# Altium footprint library TLP383GR-TPL,E.PcbLib: 3 footprints
Each footprint in its own frame and in the unit in brackets; x right, y up, seen from the top. Pads: shape width x height; smd on the part's side, far side on the other; paste and mask are expansions set on the pad; w line width, h text height; cw(c..) or ccw(c..) is an arc to the next point about the centre after c.
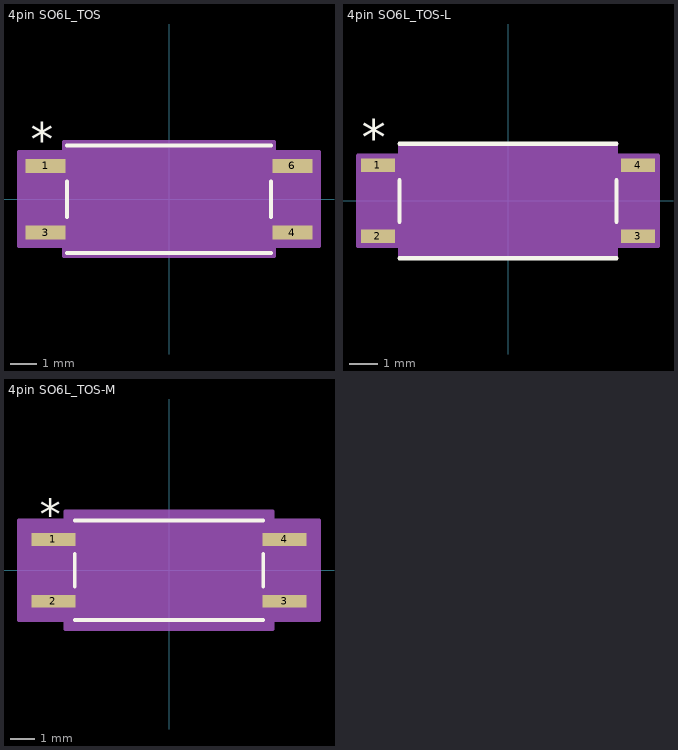
[diagram p0: the footprints below, top view; thin cyan lines are the x and y axes]

## 4pin SO6L_TOS [mil]
pads (4):
  rect 59.56x20.97 smd paste+0 mask+0: 1(-185,50) 3(-185,-50) 4(185,-50) 6(185,50)
Top Overlay:
  lines w6: -152.5,-80.5 152.5,-80.5 ; -152.5,-26.7 -152.5,26.7 ; -152.5,80.5 152.5,80.5 ; 152.5,-26.7 152.5,26.7
  text "*" at -207.5,65.97 h50
  text ".Designator" at -137.5,-25 h50
Mechanical 13:
  lines w1: -12,75.5 ccw(c0,75.5) 12,75.5 ; -201,-59.5 -147.5,-59.5 -147.5,-40.5 -201,-40.5 -201,-59.5 ; -201,40.5 -147.5,40.5 -147.5,59.5 -201,59.5 -201,40.5 ; -147.5,-75.5 -147.5,75.5 147.5,75.5 147.5,-75.5 -147.5,-75.5 ; 147.5,-59.5 201,-59.5 201,-40.5 147.5,-40.5 147.5,-59.5 ; 147.5,40.5 201,40.5 201,59.5 147.5,59.5 147.5,40.5
  text ".Designator" at -137.5,-25 h50
  text "*" at -145,22.5 h50
Mechanical 15:
  region: -157.5,-70.48 -224.78,-70.48 -224.78,70.48 -157.5,70.48 -157.5,85.5 157.5,85.5 157.5,70.48 224.78,70.48 224.78,-70.48 157.5,-70.48 157.5,-85.5 -157.5,-85.5
  lines w6: -224.78,-70.48 -157.5,-70.48 -157.5,-85.5 157.5,-85.5 157.5,-70.48 224.78,-70.48 224.78,70.48 157.5,70.48 157.5,85.5 -157.5,85.5 -157.5,70.48 -224.78,70.48 -224.78,-70.48
3D body "4pinSO6L_TOS.step": height 87.09, standoff 0, extent -200.98,-75.51 200.98,75.51

## 4pin SO6L_TOS-L [mil]
pads (4):
  rect 47.75x19 smd paste+0 mask+0: 1(-183.03,50) 2(-183.03,-50) 3(183.03,-50) 4(183.03,50)
Top Overlay:
  lines w6: -152.5,-80.5 152.5,-80.5 ; -152.5,-29.22 -152.5,29.22 ; -152.5,80.5 152.5,80.5 ; 152.5,-29.22 152.5,29.22
  text ".Designator" at -137.5,-25 h50
  text "*" at -205.53,64 h50
Mechanical 13:
  lines w1: -12,75.5 ccw(c0,75.5) 12,75.5 ; -201,-59.5 -201,-40.5 -147.5,-40.5 -147.5,-59.5 -201,-59.5 ; -201,40.5 -201,59.5 -147.5,59.5 -147.5,40.5 -201,40.5 ; -147.5,-75.5 147.5,-75.5 147.5,75.5 -147.5,75.5 -147.5,-75.5 ; 147.5,-59.5 147.5,-40.5 201,-40.5 201,-59.5 147.5,-59.5 ; 147.5,40.5 147.5,59.5 201,59.5 201,40.5 147.5,40.5
  text "*" at -145,22.5 h50
  text ".Designator" at -137.5,-25 h50
Mechanical 15:
  region: -151.5,-63.5 -210.91,-63.5 -210.91,63.5 -151.5,63.5 -151.5,79.5 151.5,79.5 151.5,63.5 210.91,63.5 210.91,-63.5 151.5,-63.5 151.5,-79.5 -151.5,-79.5
  lines w6: -210.91,-63.5 -210.91,63.5 -151.5,63.5 -151.5,79.5 151.5,79.5 151.5,63.5 210.91,63.5 210.91,-63.5 151.5,-63.5 151.5,-79.5 -151.5,-79.5 -151.5,-63.5 -210.91,-63.5
3D body: height 10, standoff 0, extent 0,0 10,10

## 4pin SO6L_TOS-M [mil]
pads (4):
  rect 71.37x20.97 smd paste+0 mask+0: 1(-186.97,50) 2(-186.97,-50) 3(186.97,-50) 4(186.97,50)
Top Overlay:
  lines w6: -152.5,-80.5 152.5,-80.5 ; -152.5,-26.42 -152.5,26.42 ; -152.5,80.5 152.5,80.5 ; 152.5,-26.42 152.5,26.42
  text ".Designator" at -137.5,-25 h50
  text "*" at -209.47,65.97 h50
Mechanical 13:
  lines w1: -12,75.5 ccw(c0,75.5) 12,75.5 ; -201,-59.5 -201,-40.5 -147.5,-40.5 -147.5,-59.5 -201,-59.5 ; -201,40.5 -201,59.5 -147.5,59.5 -147.5,40.5 -201,40.5 ; -147.5,-75.5 147.5,-75.5 147.5,75.5 -147.5,75.5 -147.5,-75.5 ; 147.5,-59.5 147.5,-40.5 201,-40.5 201,-59.5 147.5,-59.5 ; 147.5,40.5 147.5,59.5 201,59.5 201,40.5 147.5,40.5
  text "*" at -145,22.5 h50
  text ".Designator" at -137.5,-25 h50
Mechanical 15:
  region: -167.5,-80.48 -242.65,-80.48 -242.65,80.48 -167.5,80.48 -167.5,95.5 167.5,95.5 167.5,80.48 242.65,80.48 242.65,-80.48 167.5,-80.48 167.5,-95.5 -167.5,-95.5
  lines w6: -242.65,-80.48 -242.65,80.48 -167.5,80.48 -167.5,95.5 167.5,95.5 167.5,80.48 242.65,80.48 242.65,-80.48 167.5,-80.48 167.5,-95.5 -167.5,-95.5 -167.5,-80.48 -242.65,-80.48
3D body: height 10, standoff 0, extent 0,0 10,10